# Altium schematic symbol library TW-05-02-G-D-157-075.SchLib: 1 symbol
Pins are listed as number, name and electrical type; pins without a type are passive.

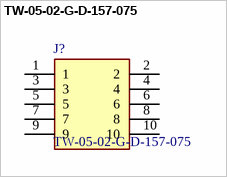
[diagram p0: symbol TW-05-02-G-D-157-075]

## TW-05-02-G-D-157-075
designator J?
Board to Board & Mezzanine Connectors 2.00 mm Flex Stack, Flexible Board Stacker, Surface Mount; Manufacturer_Name: SAMTEC; Geometry.Height: 7.694mm; Mouser Part Number: 200-TW0502GD157075; Mouser Price/Stock: https://www.mouser.co.uk/ProductDetail/Samtec/TW-05-02-G-D-157-075?qs=%252BZP6%2F%252BtExtCZO5EqZnHIsg%3D%3D; Manufacturer_Part_Number: TW-05-02-G-D-157-075; Datasheet Link: *
footprint HDRV10W51P200_2X5_1000X400X769P
pins: 1, 2, 3, 4, 5, 6, 7, 8, 9, 10